# Altium footprint library WR-MPC3.PcbLib: 235 footprints (part 11 of 15)
Each footprint in its own frame and in the unit in brackets; x right, y up, seen from the top. Pads: shape width x height; smd on the part's side, far side on the other; paste and mask are expansions set on the pad; w line width, h text height; cw(c..) or ccw(c..) is an arc to the next point about the centre after c.
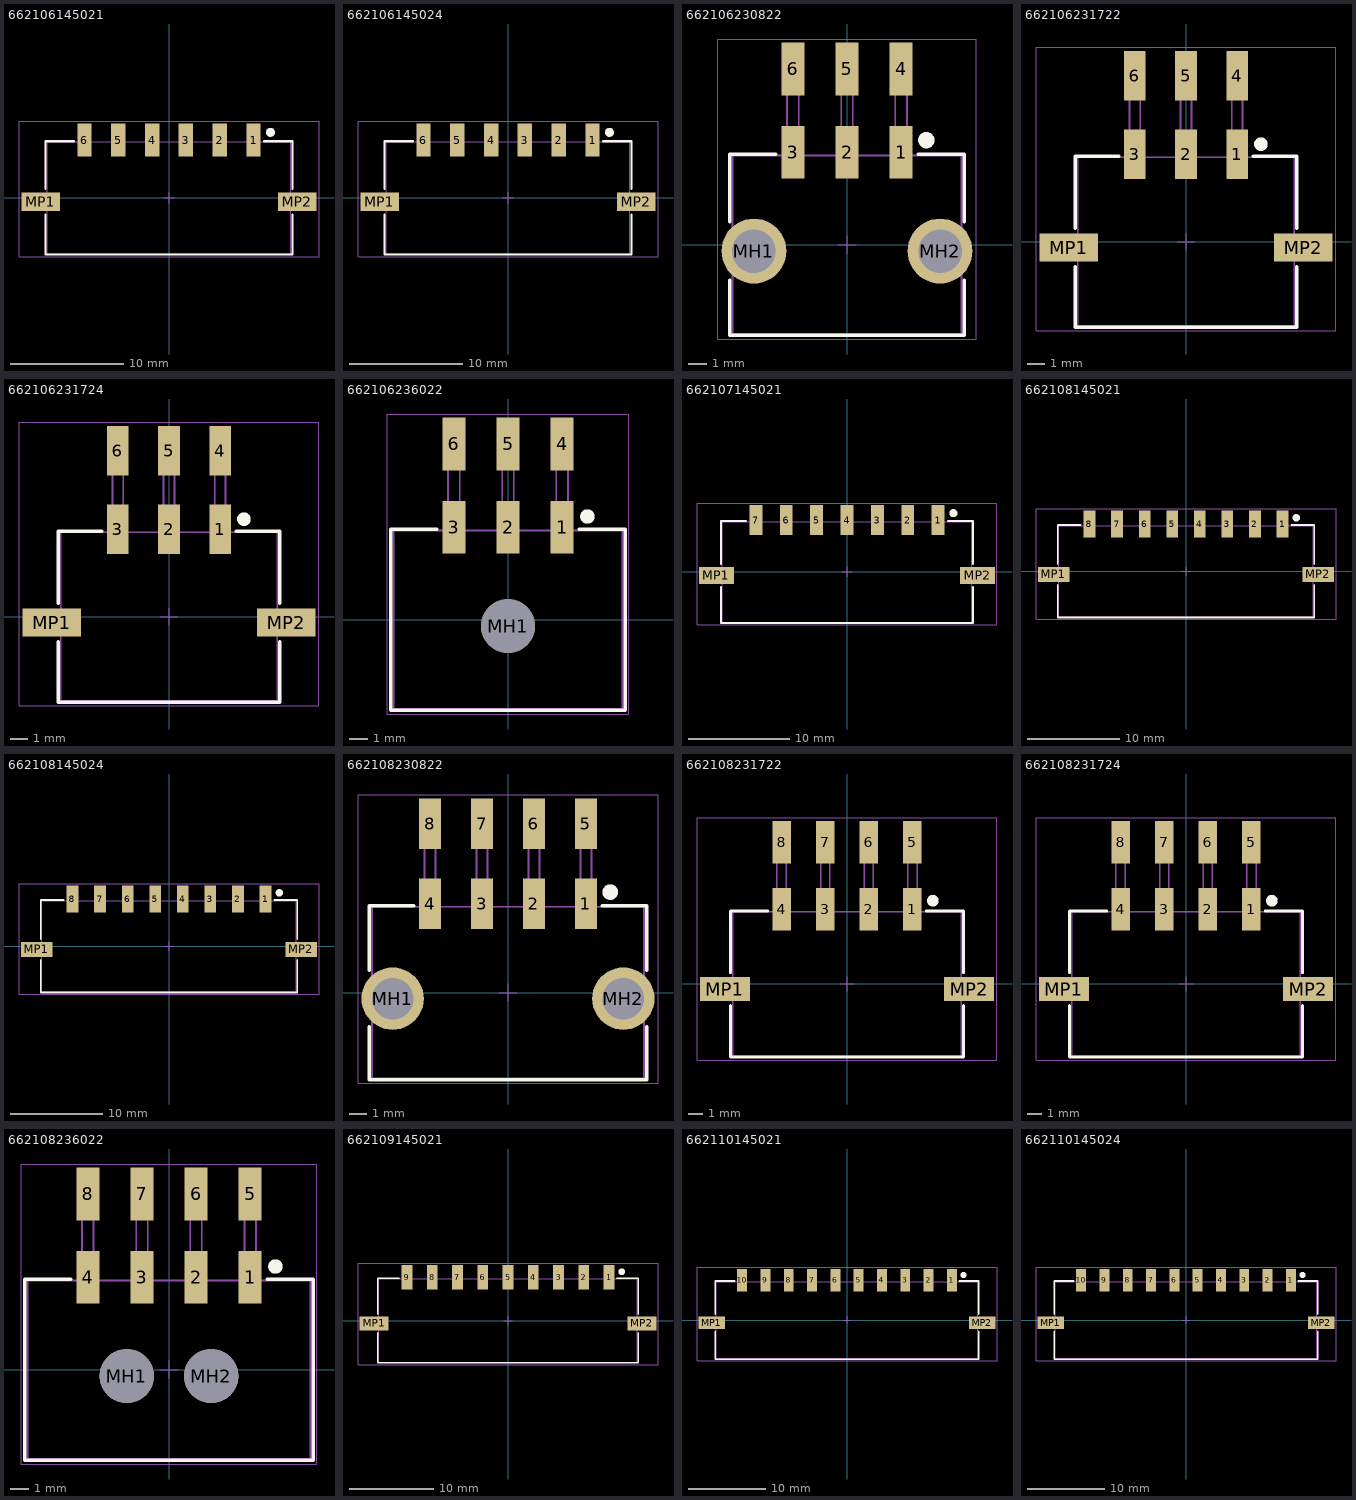
[diagram p10: the footprints below, top view; thin cyan lines are the x and y axes]

## 662106145021 [mm] "3.00mm Male Single Row Angled Header, 6p"
height 5.57
pads (8):
  rect 1.27x2.92 smd: 1(7.5,5.12) 2(4.5,5.12) 3(1.5,5.12) 4(-1.5,5.12) 5(-4.5,5.12) 6(-7.5,5.12)
  rect 3.43x1.65 smd: MP1(-11.395,-0.35) MP2(11.395,-0.35)
Top Overlay:
  circle w0.4: c9,5.8 r0.2
  lines w0.2: -10.95,-1.475 -10.95,-5.025 10.95,-5.025 10.95,-1.475 ; -10.95,0.775 -10.95,5.025 -8.45,5.025 ; 8.45,5.025 10.95,5.025 10.95,0.775
Top Designator:
  text ".Designator" at -7.498,-0.5 h1.5
Top Component Outline:
  lines w0.1: -10.825,-1 -12.825,-1 -12.825,0.3 -10.825,0.3 ; -7.82,4.95 -7.82,6.4 -7.18,6.4 -7.18,4.95 ; -4.82,4.95 -4.82,6.4 -4.18,6.4 -4.18,4.95 ; -1.82,4.95 -1.82,6.4 -1.18,6.4 -1.18,4.95 ; 1.18,4.95 1.18,6.4 1.82,6.4 1.82,4.95 ; 4.18,4.95 4.18,6.4 4.82,6.4 4.82,4.95 ; 7.18,4.95 7.18,6.4 7.82,6.4 7.82,4.95 ; 10.825,-1 12.825,-1 12.825,0.3 10.825,0.3 ; -10.825,-4.95 10.825,-4.95 10.825,4.95 -10.825,4.95 -10.825,-4.95
Top 3D Body:
  lines w0.1: -10.825,-1 -12.825,-1 -12.825,0.3 -10.825,0.3 ; -7.82,4.95 -7.82,6.4 -7.18,6.4 -7.18,4.95 ; -4.82,4.95 -4.82,6.4 -4.18,6.4 -4.18,4.95 ; -1.82,4.95 -1.82,6.4 -1.18,6.4 -1.18,4.95 ; 1.18,4.95 1.18,6.4 1.82,6.4 1.82,4.95 ; 4.18,4.95 4.18,6.4 4.82,6.4 4.82,4.95 ; 7.18,4.95 7.18,6.4 7.82,6.4 7.82,4.95 ; 10.825,-1 12.825,-1 12.825,0.3 10.825,0.3 ; -10.825,-4.95 10.825,-4.95 10.825,4.95 -10.825,4.95 -10.825,-4.95
Top Courtyard:
  lines w0.05: -13.31,-5.225 13.31,-5.225 13.31,6.78 -13.31,6.78 -13.31,-5.225
Top Component Center:
  lines w0.05: -0.5,0 0.5,0 ; 0,-0.5 0,0.5
3D body "662106145021.stp": height 5.61, standoff -0.03, extent -12.823,-4.95 12.823,6.403

## 662106145024 [mm] "3.00mm Male Single Row Angled Header, 6p"
height 5.57
pads (8):
  rect 1.27x2.92 smd: 1(7.5,5.12) 2(4.5,5.12) 3(1.5,5.12) 4(-1.5,5.12) 5(-4.5,5.12) 6(-7.5,5.12)
  rect 3.43x1.65 smd: MP1(-11.395,-0.35) MP2(11.395,-0.35)
Top Overlay:
  circle w0.4: c9,5.8 r0.2
  lines w0.2: -10.95,-1.475 -10.95,-5.025 10.95,-5.025 10.95,-1.475 ; -10.95,0.775 -10.95,5.025 -8.45,5.025 ; 8.45,5.025 10.95,5.025 10.95,0.775
Top Designator:
  text ".Designator" at -7.498,-0.5 h1.5
Top Component Outline:
  lines w0.1: -10.825,-1 -12.825,-1 -12.825,0.3 -10.825,0.3 ; -7.82,4.95 -7.82,6.4 -7.18,6.4 -7.18,4.95 ; -4.82,4.95 -4.82,6.4 -4.18,6.4 -4.18,4.95 ; -1.82,4.95 -1.82,6.4 -1.18,6.4 -1.18,4.95 ; 1.18,4.95 1.18,6.4 1.82,6.4 1.82,4.95 ; 4.18,4.95 4.18,6.4 4.82,6.4 4.82,4.95 ; 7.18,4.95 7.18,6.4 7.82,6.4 7.82,4.95 ; 10.825,-1 12.825,-1 12.825,0.3 10.825,0.3 ; -10.825,-4.95 -10.825,4.95 10.825,4.95 10.825,-4.95 -10.825,-4.95
Top 3D Body:
  lines w0.1: -10.825,-1 -12.825,-1 -12.825,0.3 -10.825,0.3 ; -7.82,4.95 -7.82,6.4 -7.18,6.4 -7.18,4.95 ; -4.82,4.95 -4.82,6.4 -4.18,6.4 -4.18,4.95 ; -1.82,4.95 -1.82,6.4 -1.18,6.4 -1.18,4.95 ; 1.18,4.95 1.18,6.4 1.82,6.4 1.82,4.95 ; 4.18,4.95 4.18,6.4 4.82,6.4 4.82,4.95 ; 7.18,4.95 7.18,6.4 7.82,6.4 7.82,4.95 ; 10.825,-1 12.825,-1 12.825,0.3 10.825,0.3 ; -10.825,-4.95 -10.825,4.95 10.825,4.95 10.825,-4.95 -10.825,-4.95
Top Courtyard:
  lines w0.05: -13.31,-5.225 -13.31,6.78 13.31,6.78 13.31,-5.225 -13.31,-5.225
Top Component Center:
  lines w0.05: -0.5,0 0.5,0 ; 0,-0.5 0,0.5
3D body "662106145024.stp": height 5.61, standoff -0.03, extent -12.823,-4.95 12.823,6.403

## 662106230822 [mm] "3.00mm SMT Male Dual Row Angled Header with THT Retention Clip, 6p"
height 8.26
pads (8):
  rect 1.27x2.92 smd: 1(3,5.13) 2(0,5.13) 3(-3,5.13) 4(3,9.75) 5(0,9.75) 6(-3,9.75)
  round 3.6 hole 2.41: MH1(-5.16,-0.35) MH2(5.16,-0.35)
Top Overlay:
  circle w0.5: c4.4,5.8 r0.2
  lines w0.2: -6.5,-1.975 -6.5,-5.025 6.5,-5.025 6.5,-1.975 ; -6.5,1.275 -6.5,5.025 -3.95,5.025 ; 3.95,5.025 6.5,5.025 6.5,1.275
Top Designator:
  text ".Designator" at -7.498,-0.5 h1.5
Top Component Outline:
  lines w0.1: -3.32,4.95 -3.32,10.95 -2.68,10.95 -2.68,4.95 ; -3.32,6.3 -2.68,6.3 ; -0.32,4.95 -0.32,10.95 0.32,10.95 0.32,4.95 ; -0.32,6.3 0.32,6.3 ; 2.68,4.95 2.68,10.95 3.32,10.95 3.32,4.95 ; 2.68,6.3 3.32,6.3 ; -6.35,-4.95 -6.35,4.95 6.35,4.95 6.35,-4.95 -6.35,-4.95
Top 3D Body:
  lines w0.1: -3.32,4.95 -3.32,10.95 -2.68,10.95 -2.68,4.95 ; -3.32,6.3 -2.68,6.3 ; -0.32,4.95 -0.32,10.95 0.32,10.95 0.32,4.95 ; -0.32,6.3 0.32,6.3 ; 2.68,4.95 2.68,10.95 3.32,10.95 3.32,4.95 ; 2.68,6.3 3.32,6.3 ; -6.35,-4.95 -6.35,4.95 6.35,4.95 6.35,-4.95 -6.35,-4.95
Top Courtyard:
  lines w0.05: -7.16,-5.225 7.16,-5.225 7.16,11.41 -7.16,11.41 -7.16,-5.225
Top Component Center:
  lines w0.05: -0.5,0 0.5,0 ; 0,-0.5 0,0.5
3D body "662106230822.stp": height 8.79, standoff -3.07, extent -6.35,-4.95 6.35,10.95

## 662106231722 [mm] "3.00mm SMT Male Dual Row Angled Header with SMT Solder Tab (Reel), 6p"
height 8.26
pads (8):
  rect 1.27x2.92 smd: 1(3,5.13) 2(0,5.13) 3(-3,5.13) 4(3,9.75) 5(0,9.75) 6(-3,9.75)
  rect 3.43x1.65 smd: MP1(-6.895,-0.35) MP2(6.895,-0.35)
Top Overlay:
  circle w0.4: c4.4,5.725 r0.2
  lines w0.2: -6.5,-1.475 -6.5,-5.025 6.5,-5.025 6.5,-1.475 ; -6.5,0.775 -6.5,5.025 -3.95,5.025 ; 3.95,5.025 6.5,5.025 6.5,0.775
Top Designator:
  text ".Designator" at -7.498,-0.5 h1.5
Top Component Outline:
  lines w0.1: -6.35,-1.1 -8.05,-1.1 -8.05,0.4 -6.35,0.4 ; -3.32,4.95 -3.32,10.95 -2.68,10.95 -2.68,4.95 ; -3.32,6.3 -2.68,6.3 ; -0.32,4.95 -0.32,10.95 0.32,10.95 0.32,4.95 ; -0.32,6.3 0.32,6.3 ; 2.68,4.95 2.68,10.95 3.32,10.95 3.32,4.95 ; 2.68,6.3 3.32,6.3 ; 6.35,-1.1 8.05,-1.1 8.05,0.4 6.35,0.4 ; -6.35,-4.95 -6.35,4.95 6.35,4.95 6.35,-4.95 -6.35,-4.95
Top 3D Body:
  lines w0.1: -6.35,-1.1 -8.05,-1.1 -8.05,0.4 -6.35,0.4 ; -3.32,4.95 -3.32,10.95 -2.68,10.95 -2.68,4.95 ; -3.32,6.3 -2.68,6.3 ; -0.32,4.95 -0.32,10.95 0.32,10.95 0.32,4.95 ; -0.32,6.3 0.32,6.3 ; 2.68,4.95 2.68,10.95 3.32,10.95 3.32,4.95 ; 2.68,6.3 3.32,6.3 ; 6.35,-1.1 8.05,-1.1 8.05,0.4 6.35,0.4 ; -6.35,-4.95 -6.35,4.95 6.35,4.95 6.35,-4.95 -6.35,-4.95
Top Courtyard:
  lines w0.05: -8.81,-5.225 8.81,-5.225 8.81,11.41 -8.81,11.41 -8.81,-5.225
Top Component Center:
  lines w0.05: -0.5,0 0.5,0 ; 0,-0.5 0,0.5
3D body "662106231722.stp": height 8.78, standoff 0.02, extent -8.05,-4.95 8.05,10.95

## 662106231724 [mm] "3.00mm SMT Male Dual Row Angled Header with SMT Solder Tab (Reel), 6p"
height 8.26
pads (8):
  rect 1.27x2.92 smd: 1(3,5.13) 2(0,5.13) 3(-3,5.13) 4(3,9.75) 5(0,9.75) 6(-3,9.75)
  rect 3.43x1.65 smd: MP1(-6.895,-0.35) MP2(6.895,-0.35)
Top Overlay:
  circle w0.4: c4.4,5.725 r0.2
  lines w0.2: -6.5,-1.475 -6.5,-5.025 6.5,-5.025 6.5,-1.475 ; -6.5,0.775 -6.5,5.025 -3.95,5.025 ; 3.95,5.025 6.5,5.025 6.5,0.775
Top Designator:
  text ".Designator" at -7.498,-0.5 h1.5
Top Component Outline:
  lines w0.1: -6.35,-1.1 -8.05,-1.1 -8.05,0.4 -6.35,0.4 ; -3.32,4.95 -3.32,10.95 -2.68,10.95 -2.68,4.95 ; -3.32,6.3 -2.68,6.3 ; -0.32,4.95 -0.32,10.95 0.32,10.95 0.32,4.95 ; -0.32,6.3 0.32,6.3 ; 2.68,4.95 2.68,10.95 3.32,10.95 3.32,4.95 ; 2.68,6.3 3.32,6.3 ; 6.35,-1.1 8.05,-1.1 8.05,0.4 6.35,0.4 ; -6.35,-4.95 -6.35,4.95 6.35,4.95 6.35,-4.95 -6.35,-4.95
Top 3D Body:
  lines w0.1: -6.35,-1.1 -8.05,-1.1 -8.05,0.4 -6.35,0.4 ; -3.32,4.95 -3.32,10.95 -2.68,10.95 -2.68,4.95 ; -3.32,6.3 -2.68,6.3 ; -0.32,4.95 -0.32,10.95 0.32,10.95 0.32,4.95 ; -0.32,6.3 0.32,6.3 ; 2.68,4.95 2.68,10.95 3.32,10.95 3.32,4.95 ; 2.68,6.3 3.32,6.3 ; 6.35,-1.1 8.05,-1.1 8.05,0.4 6.35,0.4 ; -6.35,-4.95 -6.35,4.95 6.35,4.95 6.35,-4.95 -6.35,-4.95
Top Courtyard:
  lines w0.05: -8.81,-5.225 8.81,-5.225 8.81,11.41 -8.81,11.41 -8.81,-5.225
Top Component Center:
  lines w0.05: -0.5,0 0.5,0 ; 0,-0.5 0,0.5
3D body "662106231724.stp": height 8.76, standoff 0, extent -8.05,-4.95 8.05,10.95

## 662106236022 [mm] "3.00mm SMT Male Dual Row Angled Header with Plastic Pegs, 6p"
height 8.26
pads (7):
  rect 1.27x2.92 smd: 1(3,5.13) 2(0,5.13) 3(-3,5.13) 4(3,9.75) 5(0,9.75) 6(-3,9.75)
  round 3 hole 3 unplated: MH1(0,-0.35)
Top Overlay:
  circle w0.4: c4.4,5.725 r0.2
  lines w0.2: -3.95,5.025 -6.5,5.025 -6.5,-5.025 6.5,-5.025 6.5,5.025 3.95,5.025
Top Designator:
  text ".Designator" at -7.498,-0.5 h1.5
Top Component Outline:
  lines w0.1: -3.32,4.95 -3.32,10.95 -2.68,10.95 -2.68,4.95 ; -3.32,6.3 -2.68,6.3 ; -0.32,4.95 -0.32,10.95 0.32,10.95 0.32,4.95 ; -0.32,6.3 0.32,6.3 ; 2.68,4.95 2.68,10.95 3.32,10.95 3.32,4.95 ; 2.68,6.3 3.32,6.3 ; -6.35,-4.95 6.35,-4.95 6.35,4.95 -6.35,4.95 -6.35,-4.95
Top 3D Body:
  lines w0.1: -3.32,4.95 -3.32,10.95 -2.68,10.95 -2.68,4.95 ; -3.32,6.3 -2.68,6.3 ; -0.32,4.95 -0.32,10.95 0.32,10.95 0.32,4.95 ; -0.32,6.3 0.32,6.3 ; 2.68,4.95 2.68,10.95 3.32,10.95 3.32,4.95 ; 2.68,6.3 3.32,6.3 ; -6.35,-4.95 -6.35,4.95 6.35,4.95 6.35,-4.95 -6.35,-4.95
Top Courtyard:
  lines w0.05: -6.7,-5.225 6.7,-5.225 6.7,11.41 -6.7,11.41 -6.7,-5.225
Top Component Center:
  lines w0.05: -0.5,0 0.5,0 ; 0,-0.5 0,0.5
3D body "662106236022.stp": height 8.79, standoff -3.17, extent -6.35,-4.95 6.35,10.95

## 662107145021 [mm] "3.00mm Male Single Row Angled Header, 7p"
height 5.57
pads (9):
  rect 1.27x2.92 smd: 1(9,5.12) 2(6,5.12) 3(3,5.12) 4(0,5.12) 5(-3,5.12) 6(-6,5.12) 7(-9,5.12)
  rect 3.43x1.65 smd: MP1(-12.895,-0.35) MP2(12.895,-0.35)
Top Overlay:
  circle w0.4: c10.5,5.8 r0.2
  lines w0.2: -12.45,-1.475 -12.45,-5.025 12.45,-5.025 12.45,-1.475 ; -12.45,0.775 -12.45,5.025 -9.95,5.025 ; 9.95,5.025 12.45,5.025 12.45,0.775
Top Designator:
  text ".Designator" at -7.498,-0.5 h1.5
Top Component Outline:
  lines w0.1: -12.325,-1 -14.325,-1 -14.325,0.3 -12.325,0.3 ; -9.32,4.95 -9.32,6.4 -8.68,6.4 -8.68,4.95 ; -6.32,4.95 -6.32,6.4 -5.68,6.4 -5.68,4.95 ; -3.32,4.95 -3.32,6.4 -2.68,6.4 -2.68,4.95 ; -0.32,4.95 -0.32,6.4 0.32,6.4 0.32,4.95 ; 2.68,4.95 2.68,6.4 3.32,6.4 3.32,4.95 ; 5.68,4.95 5.68,6.4 6.32,6.4 6.32,4.95 ; 8.68,4.95 8.68,6.4 9.32,6.4 9.32,4.95 ; 12.325,-1 14.325,-1 14.325,0.3 12.325,0.3 ; -12.325,-4.95 12.325,-4.95 12.325,4.95 -12.325,4.95 -12.325,-4.95
Top 3D Body:
  lines w0.1: -12.325,-1 -14.325,-1 -14.325,0.3 -12.325,0.3 ; -9.32,4.95 -9.32,6.4 -8.68,6.4 -8.68,4.95 ; -6.32,4.95 -6.32,6.4 -5.68,6.4 -5.68,4.95 ; -3.32,4.95 -3.32,6.4 -2.68,6.4 -2.68,4.95 ; -0.32,4.95 -0.32,6.4 0.32,6.4 0.32,4.95 ; 2.68,4.95 2.68,6.4 3.32,6.4 3.32,4.95 ; 5.68,4.95 5.68,6.4 6.32,6.4 6.32,4.95 ; 8.68,4.95 8.68,6.4 9.32,6.4 9.32,4.95 ; 12.325,-1 14.325,-1 14.325,0.3 12.325,0.3 ; -12.325,-4.95 12.325,-4.95 12.325,4.95 -12.325,4.95 -12.325,-4.95
Top Courtyard:
  lines w0.05: -14.81,-5.225 14.81,-5.225 14.81,6.78 -14.81,6.78 -14.81,-5.225
Top Component Center:
  lines w0.05: -0.5,0 0.5,0 ; 0,-0.5 0,0.5
3D body "662107145021.stp": height 5.61, standoff -0.03, extent -14.323,-4.95 14.323,6.403

## 662108145021 [mm] "3.00mm Male Single Row Angled Header, 8p"
height 5.57
pads (10):
  rect 1.27x2.92 smd: 1(10.5,5.12) 2(7.5,5.12) 3(4.5,5.12) 4(1.5,5.12) 5(-1.5,5.12) 6(-4.5,5.12) 7(-7.5,5.12) 8(-10.5,5.12)
  rect 3.43x1.65 smd: MP1(-14.395,-0.35) MP2(14.395,-0.35)
Top Overlay:
  circle w0.4: c12,5.8 r0.2
  lines w0.2: -13.95,-1.475 -13.95,-5.025 13.95,-5.025 13.95,-1.475 ; -13.95,0.775 -13.95,5.025 -11.45,5.025 ; 11.45,5.025 13.95,5.025 13.95,0.775
Top Designator:
  text ".Designator" at -7.498,-0.5 h1.5
Top Component Outline:
  lines w0.1: -13.825,-1 -15.825,-1 -15.825,0.3 -13.825,0.3 ; -10.82,4.95 -10.82,6.4 -10.18,6.4 -10.18,4.95 ; -7.82,4.95 -7.82,6.4 -7.18,6.4 -7.18,4.95 ; -4.82,4.95 -4.82,6.4 -4.18,6.4 -4.18,4.95 ; -1.82,4.95 -1.82,6.4 -1.18,6.4 -1.18,4.95 ; 1.18,4.95 1.18,6.4 1.82,6.4 1.82,4.95 ; 4.18,4.95 4.18,6.4 4.82,6.4 4.82,4.95 ; 7.18,4.95 7.18,6.4 7.82,6.4 7.82,4.95 ; 10.18,4.95 10.18,6.4 10.82,6.4 10.82,4.95 ; 13.825,-1 15.825,-1 15.825,0.3 13.825,0.3 ; -13.825,-4.95 13.825,-4.95 13.825,4.95 -13.825,4.95 -13.825,-4.95
Top 3D Body:
  lines w0.1: -13.825,-1 -15.825,-1 -15.825,0.3 -13.825,0.3 ; -10.82,4.95 -10.82,6.4 -10.18,6.4 -10.18,4.95 ; -7.82,4.95 -7.82,6.4 -7.18,6.4 -7.18,4.95 ; -4.82,4.95 -4.82,6.4 -4.18,6.4 -4.18,4.95 ; -1.82,4.95 -1.82,6.4 -1.18,6.4 -1.18,4.95 ; 1.18,4.95 1.18,6.4 1.82,6.4 1.82,4.95 ; 4.18,4.95 4.18,6.4 4.82,6.4 4.82,4.95 ; 7.18,4.95 7.18,6.4 7.82,6.4 7.82,4.95 ; 10.18,4.95 10.18,6.4 10.82,6.4 10.82,4.95 ; 13.825,-1 15.825,-1 15.825,0.3 13.825,0.3 ; -13.825,-4.95 -13.825,4.95 13.825,4.95 13.825,-4.95 -13.825,-4.95
Top Courtyard:
  lines w0.05: -16.31,-5.225 -16.31,6.78 16.31,6.78 16.31,-5.225 -16.31,-5.225
Top Component Center:
  lines w0.05: -0.5,0 0.5,0 ; 0,-0.5 0,0.5
3D body "662108145021.stp": height 5.61, standoff -0.03, extent -15.823,-4.95 15.823,6.403

## 662108145024 [mm] "3.00mm Male Single Row Angled Header, 8p"
height 5.57
pads (10):
  rect 1.27x2.92 smd: 1(10.5,5.12) 2(7.5,5.12) 3(4.5,5.12) 4(1.5,5.12) 5(-1.5,5.12) 6(-4.5,5.12) 7(-7.5,5.12) 8(-10.5,5.12)
  rect 3.43x1.65 smd: MP1(-14.395,-0.35) MP2(14.395,-0.35)
Top Overlay:
  circle w0.4: c12,5.8 r0.2
  lines w0.2: -13.95,-1.475 -13.95,-5.025 13.95,-5.025 13.95,-1.475 ; -13.95,0.775 -13.95,5.025 -11.45,5.025 ; 11.45,5.025 13.95,5.025 13.95,0.775
Top Designator:
  text ".Designator" at -7.498,-0.5 h1.5
Top Component Outline:
  lines w0.1: -13.825,-1 -15.825,-1 -15.825,0.3 -13.825,0.3 ; -10.82,4.95 -10.82,6.4 -10.18,6.4 -10.18,4.95 ; -7.82,4.95 -7.82,6.4 -7.18,6.4 -7.18,4.95 ; -4.82,4.95 -4.82,6.4 -4.18,6.4 -4.18,4.95 ; -1.82,4.95 -1.82,6.4 -1.18,6.4 -1.18,4.95 ; 1.18,4.95 1.18,6.4 1.82,6.4 1.82,4.95 ; 4.18,4.95 4.18,6.4 4.82,6.4 4.82,4.95 ; 7.18,4.95 7.18,6.4 7.82,6.4 7.82,4.95 ; 10.18,4.95 10.18,6.4 10.82,6.4 10.82,4.95 ; 13.825,-1 15.825,-1 15.825,0.3 13.825,0.3 ; -13.825,-4.95 -13.825,4.95 13.825,4.95 13.825,-4.95 -13.825,-4.95
Top 3D Body:
  lines w0.1: -13.825,-1 -15.825,-1 -15.825,0.3 -13.825,0.3 ; -10.82,4.95 -10.82,6.4 -10.18,6.4 -10.18,4.95 ; -7.82,4.95 -7.82,6.4 -7.18,6.4 -7.18,4.95 ; -4.82,4.95 -4.82,6.4 -4.18,6.4 -4.18,4.95 ; -1.82,4.95 -1.82,6.4 -1.18,6.4 -1.18,4.95 ; 1.18,4.95 1.18,6.4 1.82,6.4 1.82,4.95 ; 4.18,4.95 4.18,6.4 4.82,6.4 4.82,4.95 ; 7.18,4.95 7.18,6.4 7.82,6.4 7.82,4.95 ; 10.18,4.95 10.18,6.4 10.82,6.4 10.82,4.95 ; 13.825,-1 15.825,-1 15.825,0.3 13.825,0.3 ; -13.825,-4.95 13.825,-4.95 13.825,4.95 -13.825,4.95 -13.825,-4.95
Top Courtyard:
  lines w0.05: -16.31,-5.225 16.31,-5.225 16.31,6.78 -16.31,6.78 -16.31,-5.225
Top Component Center:
  lines w0.05: -0.5,0 0.5,0 ; 0,-0.5 0,0.5
3D body "662108145024.stp": height 5.61, standoff -0.03, extent -15.823,-4.95 15.823,6.403

## 662108230822 [mm] "3.00mm SMT Male Dual Row Angled Header with THT Retention Clip, 8p"
height 8.26
pads (10):
  rect 1.27x2.92 smd: 1(4.5,5.13) 2(1.5,5.13) 3(-1.5,5.13) 4(-4.5,5.13) 5(4.5,9.75) 6(1.5,9.75) 7(-1.5,9.75) 8(-4.5,9.75)
  round 3.6 hole 2.41: MH1(-6.66,-0.35) MH2(6.66,-0.35)
Top Overlay:
  circle w0.5: c5.9,5.8 r0.2
  lines w0.2: -8,-1.975 -8,-5.025 8,-5.025 8,-1.975 ; -8,1.275 -8,5.025 -5.45,5.025 ; 5.45,5.025 8,5.025 8,1.275
Top Designator:
  text ".Designator" at -7.498,-0.5 h1.5
Top Component Outline:
  lines w0.1: -4.82,4.95 -4.82,10.95 -4.18,10.95 -4.18,4.95 ; -4.82,6.3 -4.18,6.3 ; -1.82,4.95 -1.82,10.95 -1.18,10.95 -1.18,4.95 ; -1.82,6.3 -1.18,6.3 ; 1.18,4.95 1.18,10.95 1.82,10.95 1.82,4.95 ; 1.18,6.3 1.82,6.3 ; 4.179,4.95 4.179,10.95 4.819,10.95 4.819,4.95 ; 4.179,6.3 4.819,6.3 ; -7.85,-4.95 -7.85,4.95 7.85,4.95 7.85,-4.95 -7.85,-4.95
Top 3D Body:
  lines w0.1: -4.82,4.95 -4.82,10.95 -4.18,10.95 -4.18,4.95 ; -4.82,6.3 -4.18,6.3 ; -1.82,4.95 -1.82,10.95 -1.18,10.95 -1.18,4.95 ; -1.82,6.3 -1.18,6.3 ; 1.18,4.95 1.18,10.95 1.82,10.95 1.82,4.95 ; 1.18,6.3 1.82,6.3 ; 4.179,4.95 4.179,10.95 4.819,10.95 4.819,4.95 ; 4.179,6.3 4.819,6.3 ; -7.85,-4.95 7.85,-4.95 7.85,4.95 -7.85,4.95 -7.85,-4.95
Top Courtyard:
  lines w0.05: -8.66,-5.225 -8.66,11.41 8.66,11.41 8.66,-5.225 -8.66,-5.225
Top Component Center:
  lines w0.05: -0.5,0 0.5,0 ; 0,-0.5 0,0.5
3D body "662108230822.stp": height 8.79, standoff -3.07, extent -7.85,-4.95 7.85,10.95

## 662108231722 [mm] "3.00mm SMT Male Dual Row Angled Header with SMT Solder Tab (Reel), 8p"
height 8.26
pads (10):
  rect 1.27x2.92 smd: 1(4.5,5.13) 2(1.5,5.13) 3(-1.5,5.13) 4(-4.5,5.13) 5(4.5,9.75) 6(1.5,9.75) 7(-1.5,9.75) 8(-4.5,9.75)
  rect 3.43x1.65 smd: MP1(-8.395,-0.35) MP2(8.395,-0.35)
Top Overlay:
  circle w0.4: c5.9,5.725 r0.2
  lines w0.2: -8,-1.475 -8,-5.025 8,-5.025 8,-1.475 ; -8,0.775 -8,5.025 -5.45,5.025 ; 5.45,5.025 8,5.025 8,0.775
Top Designator:
  text ".Designator" at -7.498,-0.5 h1.5
Top Component Outline:
  lines w0.1: -7.85,-1.1 -9.55,-1.1 -9.55,0.4 -7.85,0.4 ; -4.82,4.95 -4.82,10.95 -4.18,10.95 -4.18,4.95 ; -4.82,6.3 -4.18,6.3 ; -1.82,4.95 -1.82,10.95 -1.18,10.95 -1.18,4.95 ; -1.82,6.3 -1.18,6.3 ; 1.18,4.95 1.18,10.95 1.82,10.95 1.82,4.95 ; 1.18,6.3 1.82,6.3 ; 4.18,4.95 4.18,10.95 4.82,10.95 4.82,4.95 ; 4.18,6.3 4.82,6.3 ; 7.85,-1.1 9.55,-1.1 9.55,0.4 7.85,0.4 ; -7.85,-4.95 7.85,-4.95 7.85,4.95 -7.85,4.95 -7.85,-4.95
Top 3D Body:
  lines w0.1: -7.85,-1.1 -9.55,-1.1 -9.55,0.4 -7.85,0.4 ; -4.82,4.95 -4.82,10.95 -4.18,10.95 -4.18,4.95 ; -4.82,6.3 -4.18,6.3 ; -1.82,4.95 -1.82,10.95 -1.18,10.95 -1.18,4.95 ; -1.82,6.3 -1.18,6.3 ; 1.18,4.95 1.18,10.95 1.82,10.95 1.82,4.95 ; 1.18,6.3 1.82,6.3 ; 4.18,4.95 4.18,10.95 4.82,10.95 4.82,4.95 ; 4.18,6.3 4.82,6.3 ; 7.85,-1.1 9.55,-1.1 9.55,0.4 7.85,0.4 ; -7.85,-4.95 -7.85,4.95 7.85,4.95 7.85,-4.95 -7.85,-4.95
Top Courtyard:
  lines w0.05: -10.31,-5.225 10.31,-5.225 10.31,11.41 -10.31,11.41 -10.31,-5.225
Top Component Center:
  lines w0.05: -0.5,0 0.5,0 ; 0,-0.5 0,0.5
3D body "662108231722.stp": height 8.78, standoff 0.02, extent -9.55,-4.95 9.55,10.95

## 662108231724 [mm] "3.00mm SMT Male Dual Row Angled Header with SMT Solder Tab (Reel), 8p"
height 8.26
pads (10):
  rect 1.27x2.92 smd: 1(4.5,5.13) 2(1.5,5.13) 3(-1.5,5.13) 4(-4.5,5.13) 5(4.5,9.75) 6(1.5,9.75) 7(-1.5,9.75) 8(-4.5,9.75)
  rect 3.43x1.65 smd: MP1(-8.395,-0.35) MP2(8.395,-0.35)
Top Overlay:
  circle w0.4: c5.9,5.725 r0.2
  lines w0.2: -8,-1.475 -8,-5.025 8,-5.025 8,-1.475 ; -8,0.775 -8,5.025 -5.45,5.025 ; 5.45,5.025 8,5.025 8,0.775
Top Designator:
  text ".Designator" at -7.498,-0.5 h1.5
Top Component Outline:
  lines w0.1: -7.85,-1.1 -9.55,-1.1 -9.55,0.4 -7.85,0.4 ; -4.82,4.95 -4.82,10.95 -4.18,10.95 -4.18,4.95 ; -4.82,6.3 -4.18,6.3 ; -1.82,4.95 -1.82,10.95 -1.18,10.95 -1.18,4.95 ; -1.82,6.3 -1.18,6.3 ; 1.18,4.95 1.18,10.95 1.82,10.95 1.82,4.95 ; 1.18,6.3 1.82,6.3 ; 4.18,4.95 4.18,10.95 4.82,10.95 4.82,4.95 ; 4.18,6.3 4.82,6.3 ; 7.85,-1.1 9.55,-1.1 9.55,0.4 7.85,0.4 ; -7.85,-4.95 7.85,-4.95 7.85,4.95 -7.85,4.95 -7.85,-4.95
Top 3D Body:
  lines w0.1: -7.85,-1.1 -9.55,-1.1 -9.55,0.4 -7.85,0.4 ; -4.82,4.95 -4.82,10.95 -4.18,10.95 -4.18,4.95 ; -4.82,6.3 -4.18,6.3 ; -1.82,4.95 -1.82,10.95 -1.18,10.95 -1.18,4.95 ; -1.82,6.3 -1.18,6.3 ; 1.18,4.95 1.18,10.95 1.82,10.95 1.82,4.95 ; 1.18,6.3 1.82,6.3 ; 4.18,4.95 4.18,10.95 4.82,10.95 4.82,4.95 ; 4.18,6.3 4.82,6.3 ; 7.85,-1.1 9.55,-1.1 9.55,0.4 7.85,0.4 ; -7.85,-4.95 -7.85,4.95 7.85,4.95 7.85,-4.95 -7.85,-4.95
Top Courtyard:
  lines w0.05: -10.31,-5.225 10.31,-5.225 10.31,11.41 -10.31,11.41 -10.31,-5.225
Top Component Center:
  lines w0.05: -0.5,0 0.5,0 ; 0,-0.5 0,0.5
3D body "662108231724.stp": height 8.76, standoff 0, extent -9.55,-4.95 9.55,10.95

## 662108236022 [mm] "3.00mm SMT Male Dual Row Angled Header with Plastic Pegs, 8p"
height 8.26
pads (10):
  rect 1.27x2.92 smd: 1(4.5,5.13) 2(1.5,5.13) 3(-1.5,5.13) 4(-4.5,5.13) 5(4.5,9.75) 6(1.5,9.75) 7(-1.5,9.75) 8(-4.5,9.75)
  round 3 hole 3 unplated: MH1(-2.34,-0.35) MH2(2.34,-0.35)
Top Overlay:
  circle w0.4: c5.9,5.725 r0.2
  lines w0.2: -5.45,5.025 -8,5.025 -8,-5.025 8,-5.025 8,5.025 5.45,5.025
Top Designator:
  text ".Designator" at -7.498,-0.5 h1.5
Top Component Outline:
  lines w0.1: -4.82,4.95 -4.82,10.95 -4.18,10.95 -4.18,4.95 ; -4.82,6.3 -4.18,6.3 ; -1.82,4.95 -1.82,10.95 -1.18,10.95 -1.18,4.95 ; -1.82,6.3 -1.18,6.3 ; 1.18,4.95 1.18,10.95 1.82,10.95 1.82,4.95 ; 1.18,6.3 1.82,6.3 ; 4.18,4.95 4.18,10.95 4.82,10.95 4.82,4.95 ; 4.18,6.3 4.82,6.3 ; -7.85,-4.95 -7.85,4.95 7.85,4.95 7.85,-4.95 -7.85,-4.95
Top 3D Body:
  lines w0.1: -4.82,4.95 -4.82,10.95 -4.18,10.95 -4.18,4.95 ; -4.82,6.3 -4.18,6.3 ; -1.82,4.95 -1.82,10.95 -1.18,10.95 -1.18,4.95 ; -1.82,6.3 -1.18,6.3 ; 1.18,4.95 1.18,10.95 1.82,10.95 1.82,4.95 ; 1.18,6.3 1.82,6.3 ; 4.18,4.95 4.18,10.95 4.82,10.95 4.82,4.95 ; 4.18,6.3 4.82,6.3 ; -7.85,-4.95 7.85,-4.95 7.85,4.95 -7.85,4.95 -7.85,-4.95
Top Courtyard:
  lines w0.05: -8.2,-5.225 -8.2,11.41 8.2,11.41 8.2,-5.225 -8.2,-5.225
Top Component Center:
  lines w0.05: -0.5,0 0.5,0 ; 0,-0.5 0,0.5
3D body "662108236022.stp": height 8.79, standoff -3.17, extent -7.85,-4.95 7.85,10.95

## 662109145021 [mm] "3.00mm Male Single Row Angled Header, 9p"
height 5.57
pads (11):
  rect 1.27x2.92 smd: 1(12,5.12) 2(9,5.12) 3(6,5.12) 4(3,5.12) 5(0,5.12) 6(-3,5.12) 7(-6,5.12) 8(-9,5.12) 9(-12,5.12)
  rect 3.43x1.65 smd: MP1(-15.895,-0.35) MP2(15.895,-0.35)
Top Overlay:
  circle w0.4: c13.5,5.8 r0.2
  lines w0.2: -15.45,-1.475 -15.45,-5.025 15.45,-5.025 15.45,-1.475 ; -15.45,0.775 -15.45,5.025 -12.95,5.025 ; 12.95,5.025 15.45,5.025 15.45,0.775
Top Designator:
  text ".Designator" at -7.498,-0.5 h1.5
Top Component Outline:
  lines w0.1: -15.325,-1 -17.325,-1 -17.325,0.3 -15.325,0.3 ; -12.32,4.95 -12.32,6.4 -11.68,6.4 -11.68,4.95 ; -9.32,4.95 -9.32,6.4 -8.68,6.4 -8.68,4.95 ; -6.32,4.95 -6.32,6.4 -5.68,6.4 -5.68,4.95 ; -3.32,4.95 -3.32,6.4 -2.68,6.4 -2.68,4.95 ; -0.32,4.95 -0.32,6.4 0.32,6.4 0.32,4.95 ; 2.68,4.95 2.68,6.4 3.32,6.4 3.32,4.95 ; 5.68,4.95 5.68,6.4 6.32,6.4 6.32,4.95 ; 8.68,4.95 8.68,6.4 9.32,6.4 9.32,4.95 ; 11.68,4.95 11.68,6.4 12.32,6.4 12.32,4.95 ; 15.325,-1 17.325,-1 17.325,0.3 15.325,0.3 ; -15.325,-4.95 15.325,-4.95 15.325,4.95 -15.325,4.95 -15.325,-4.95
Top 3D Body:
  lines w0.1: -15.325,-1 -17.325,-1 -17.325,0.3 -15.325,0.3 ; -12.32,4.95 -12.32,6.4 -11.68,6.4 -11.68,4.95 ; -9.32,4.95 -9.32,6.4 -8.68,6.4 -8.68,4.95 ; -6.32,4.95 -6.32,6.4 -5.68,6.4 -5.68,4.95 ; -3.32,4.95 -3.32,6.4 -2.68,6.4 -2.68,4.95 ; -0.32,4.95 -0.32,6.4 0.32,6.4 0.32,4.95 ; 2.68,4.95 2.68,6.4 3.32,6.4 3.32,4.95 ; 5.68,4.95 5.68,6.4 6.32,6.4 6.32,4.95 ; 8.68,4.95 8.68,6.4 9.32,6.4 9.32,4.95 ; 11.68,4.95 11.68,6.4 12.32,6.4 12.32,4.95 ; 15.325,-1 17.325,-1 17.325,0.3 15.325,0.3 ; -15.325,-4.95 -15.325,4.95 15.325,4.95 15.325,-4.95 -15.325,-4.95
Top Courtyard:
  lines w0.05: -17.81,-5.225 -17.81,6.78 17.81,6.78 17.81,-5.225 -17.81,-5.225
Top Component Center:
  lines w0.05: -0.5,0 0.5,0 ; 0,-0.5 0,0.5
3D body "662109145021.stp": height 5.61, standoff -0.03, extent -17.323,-4.95 17.323,6.403

## 662110145021 [mm] "3.00mm Male Single Row Angled Header, 10p"
height 5.57
pads (12):
  rect 1.27x2.92 smd: 1(13.5,5.12) 2(10.5,5.12) 3(7.5,5.12) 4(4.5,5.12) 5(1.5,5.12) 6(-1.5,5.12) 7(-4.5,5.12) 8(-7.5,5.12) 9(-10.5,5.12) 10(-13.5,5.12)
  rect 3.43x1.65 smd: MP1(-17.395,-0.35) MP2(17.395,-0.35)
Top Overlay:
  circle w0.4: c15,5.8 r0.2
  lines w0.2: -16.95,-1.475 -16.95,-5.025 16.95,-5.025 16.95,-1.475 ; -16.95,0.775 -16.95,5.025 -14.45,5.025 ; 14.45,5.025 16.95,5.025 16.95,0.775
Top Designator:
  text ".Designator" at -7.498,-0.5 h1.5
Top Component Outline:
  lines w0.1: -16.825,-1 -18.825,-1 -18.825,0.3 -16.825,0.3 ; -13.82,4.95 -13.82,6.4 -13.18,6.4 -13.18,4.95 ; -10.82,4.95 -10.82,6.4 -10.18,6.4 -10.18,4.95 ; -7.82,4.95 -7.82,6.4 -7.18,6.4 -7.18,4.95 ; -4.82,4.95 -4.82,6.4 -4.18,6.4 -4.18,4.95 ; -1.82,4.95 -1.82,6.4 -1.18,6.4 -1.18,4.95 ; 1.18,4.95 1.18,6.4 1.82,6.4 1.82,4.95 ; 4.18,4.95 4.18,6.4 4.82,6.4 4.82,4.95 ; 7.18,4.95 7.18,6.4 7.82,6.4 7.82,4.95 ; 10.18,4.95 10.18,6.4 10.82,6.4 10.82,4.95 ; 13.18,4.95 13.18,6.4 13.82,6.4 13.82,4.95 ; 16.825,-1 18.825,-1 18.825,0.3 16.825,0.3 ; -16.825,-4.95 16.825,-4.95 16.825,4.95 -16.825,4.95 -16.825,-4.95
Top 3D Body:
  lines w0.1: -16.825,-1 -18.825,-1 -18.825,0.3 -16.825,0.3 ; -13.82,4.95 -13.82,6.4 -13.18,6.4 -13.18,4.95 ; -10.82,4.95 -10.82,6.4 -10.18,6.4 -10.18,4.95 ; -7.82,4.95 -7.82,6.4 -7.18,6.4 -7.18,4.95 ; -4.82,4.95 -4.82,6.4 -4.18,6.4 -4.18,4.95 ; -1.82,4.95 -1.82,6.4 -1.18,6.4 -1.18,4.95 ; 1.18,4.95 1.18,6.4 1.82,6.4 1.82,4.95 ; 4.18,4.95 4.18,6.4 4.82,6.4 4.82,4.95 ; 7.18,4.95 7.18,6.4 7.82,6.4 7.82,4.95 ; 10.18,4.95 10.18,6.4 10.82,6.4 10.82,4.95 ; 13.18,4.95 13.18,6.4 13.82,6.4 13.82,4.95 ; 16.825,-1 18.825,-1 18.825,0.3 16.825,0.3 ; -16.825,-4.95 16.825,-4.95 16.825,4.95 -16.825,4.95 -16.825,-4.95
Top Courtyard:
  lines w0.05: -19.31,-5.225 19.31,-5.225 19.31,6.78 -19.31,6.78 -19.31,-5.225
Top Component Center:
  lines w0.05: -0.5,0 0.5,0 ; 0,-0.5 0,0.5
3D body "662110145021.stp": height 5.61, standoff -0.03, extent -18.823,-4.95 18.823,6.403

## 662110145024 [mm] "3.00mm Male Single Row Angled Header, 10p"
height 5.57
pads (12):
  rect 1.27x2.92 smd: 1(13.5,5.12) 2(10.5,5.12) 3(7.5,5.12) 4(4.5,5.12) 5(1.5,5.12) 6(-1.5,5.12) 7(-4.5,5.12) 8(-7.5,5.12) 9(-10.5,5.12) 10(-13.5,5.12)
  rect 3.43x1.65 smd: MP1(-17.395,-0.35) MP2(17.395,-0.35)
Top Overlay:
  circle w0.4: c15,5.8 r0.2
  lines w0.2: -16.95,-1.475 -16.95,-5.025 16.95,-5.025 16.95,-1.475 ; -16.95,0.775 -16.95,5.025 -14.45,5.025 ; 14.45,5.025 16.95,5.025 16.95,0.775
Top Designator:
  text ".Designator" at -7.498,-0.5 h1.5
Top Component Outline:
  lines w0.1: -16.825,-1 -18.825,-1 -18.825,0.3 -16.825,0.3 ; -13.82,4.95 -13.82,6.4 -13.18,6.4 -13.18,4.95 ; -10.82,4.95 -10.82,6.4 -10.18,6.4 -10.18,4.95 ; -7.82,4.95 -7.82,6.4 -7.18,6.4 -7.18,4.95 ; -4.82,4.95 -4.82,6.4 -4.18,6.4 -4.18,4.95 ; -1.82,4.95 -1.82,6.4 -1.18,6.4 -1.18,4.95 ; 1.18,4.95 1.18,6.4 1.82,6.4 1.82,4.95 ; 4.18,4.95 4.18,6.4 4.82,6.4 4.82,4.95 ; 7.18,4.95 7.18,6.4 7.82,6.4 7.82,4.95 ; 10.18,4.95 10.18,6.4 10.82,6.4 10.82,4.95 ; 13.18,4.95 13.18,6.4 13.82,6.4 13.82,4.95 ; 16.825,-1 18.825,-1 18.825,0.3 16.825,0.3 ; -16.825,-4.95 -16.825,4.95 16.825,4.95 16.825,-4.95 -16.825,-4.95
Top 3D Body:
  lines w0.1: -16.825,-1 -18.825,-1 -18.825,0.3 -16.825,0.3 ; -13.82,4.95 -13.82,6.4 -13.18,6.4 -13.18,4.95 ; -10.82,4.95 -10.82,6.4 -10.18,6.4 -10.18,4.95 ; -7.82,4.95 -7.82,6.4 -7.18,6.4 -7.18,4.95 ; -4.82,4.95 -4.82,6.4 -4.18,6.4 -4.18,4.95 ; -1.82,4.95 -1.82,6.4 -1.18,6.4 -1.18,4.95 ; 1.18,4.95 1.18,6.4 1.82,6.4 1.82,4.95 ; 4.18,4.95 4.18,6.4 4.82,6.4 4.82,4.95 ; 7.18,4.95 7.18,6.4 7.82,6.4 7.82,4.95 ; 10.18,4.95 10.18,6.4 10.82,6.4 10.82,4.95 ; 13.18,4.95 13.18,6.4 13.82,6.4 13.82,4.95 ; 16.825,-1 18.825,-1 18.825,0.3 16.825,0.3 ; -16.825,-4.95 -16.825,4.95 16.825,4.95 16.825,-4.95 -16.825,-4.95
Top Courtyard:
  lines w0.05: -19.31,-5.225 -19.31,6.78 19.31,6.78 19.31,-5.225 -19.31,-5.225
Top Component Center:
  lines w0.05: -0.5,0 0.5,0 ; 0,-0.5 0,0.5
3D body "662110145024.stp": height 5.61, standoff -0.03, extent -18.823,-4.95 18.823,6.403